# Altium schematic symbol library jig.SchLib: 22 symbols
Pins are listed as number, name and electrical type; pins without a type are passive.

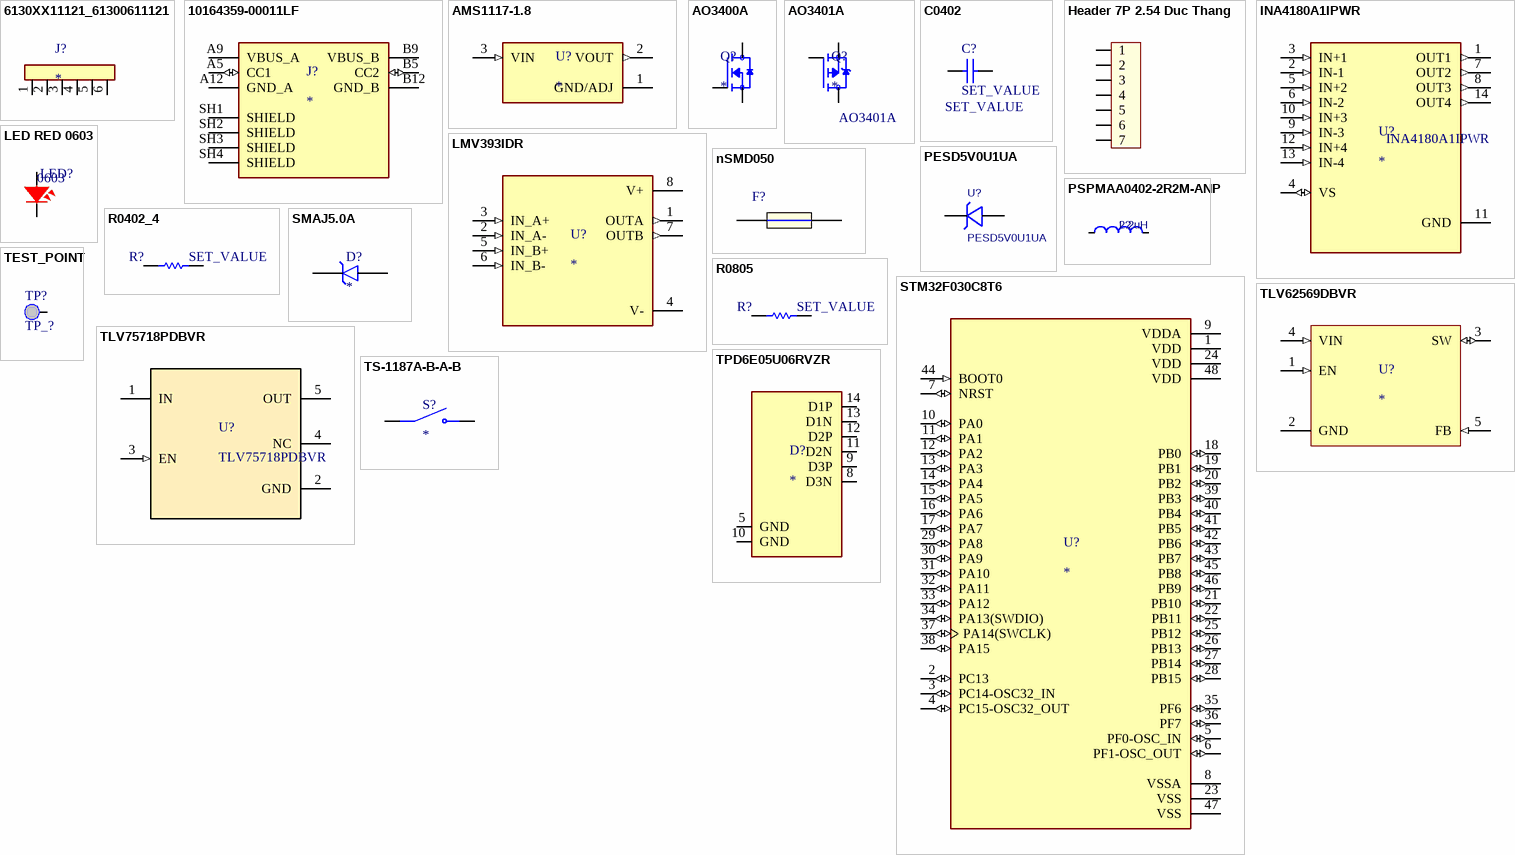
[diagram p0: symbols 6130XX11121_61300611121 to TS-1187A-B-A-B]

## 6130XX11121_61300611121
designator J?
CON THT 6P 3A 250VAC Pitch_2.54mm SINGLE-ROW PIN HEADER; MF: {'manufacturer': u'Wurth Electronics'}; MP: 61300611121; Package: None; Price: None; Value: *; Availability: Unavailable
footprint 61300611121
pins: 1, 2, 3, 4, 5, 6

## 10164359-00011LF
designator J?
CON SMD 6P USB TYPE-C RECEPTACLE SINGLE-ROW 10164359-00011LF; Manufacturer: Amphenol ICC; MF: Amphenol; MP: 1016435900011LF; SnapEDA_Link: https://www.snapeda.com/parts/1016435900011LF/Amphenol/view-part/?ref=snap; Package: USB-C-16P; Value: *; Check_prices: https://www.snapeda.com/parts/1016435900011LF/Amphenol/view-part/?ref=eda; JLCPCB Part #: C165948; LCSC Part #: C165948; Manufacturer Part Number: 10164359-00011LF
footprint AMPHENOL_10164359-00011LF
pins: A5 CC1 (io), A9 VBUS_A (power), A12 GND_A (power), B5 CC2 (io), B9 VBUS_B (power), B12 GND_B (power), SH1 SHIELD, SH2 SHIELD, SH3 SHIELD, SH4 SHIELD

## AMS1117-1.8
designator U?
IC SOT-223 LDO AMS1117-1.8; MANUFACTURER UNVERIFIED; Package: None; Price: None; Value: *; MP: AMS1117-1.8; Availability: Unavailable
footprint SOT229P700X180-4N
pins: 1 GND/ADJ (power), 2 VOUT (out), 3 VIN (in)

## AO3400A
designator Q?
N-MOS SOT-23 Vds_30V IdMax_5.7A@TA25C AO3400A; MF: Alpha & Omega Semiconductor; SnapEDA_Link: https://www.snapeda.com/parts/AO3400A/Alpha/view-part/?ref=snap; Package: SOT-23; Value: *; MP: AO3400A; Check_prices: https://www.snapeda.com/parts/AO3400A/Alpha/view-part/?ref=eda; JLCPCB Part #: C20917; LCSC Part #: C20917; Manufacturer: Alpha & Omega Semiconductor; Manufacturer Part Number: AO3400A
footprint SOT95P280X125-3N
pins: 1 G, 2 S, 3 D

## AO3401A
designator Q?  MP: AO3401A
P-MOS SOT-23 Vds_-30V IdMax_-4A@TA25C AO3401A; MF: Alpha & Omega Semiconductor; SnapEDA_Link: https://www.snapeda.com/parts/AO3401A/Alpha/view-part/?ref=snap; Package: SOT-23; Value: *; Check_prices: https://www.snapeda.com/parts/AO3401A/Alpha/view-part/?ref=eda; JLCPCB Part #: C15127; LCSC Part #: C15127; Manufacturer: Alpha & Omega Semiconductor; Manufacturer Part Number: AO3401A
footprint SOT23-3
pins: 1 G, 2 S, 3 D

## C0402
designator C?, comment SET_VALUE
CAP 0402 MLCC NON-POLARIZED GENERIC; VALUE TOLERANCE VOLTAGE AND MPN SET ON INSTANCE; Type: Capacitor; Value2: SET_VOLTAGE; Case: 0402; Package: 0402; Value1: SET_VALUE
footprint C0402L
pins: 1, 2

## Header 7P 2.54 Duc Thang
designator H?
CON THT 7P Pitch_2.54mm SINGLE-ROW; MPN UNVERIFIED; Ten_Linh_Kien: Header 7P XH2.54-7P Đực Thẳng; Ma_Hang: MH003369; Chung_Loai: Cắm; Don_Vi: Con
footprint HDR_1X07_P2.54_D1.10
pins: 1, 2, 3, 4, 5, 6, 7

## INA4180A1IPWR
designator U?  Manufacturer Part Number: INA4180A1IPWR
IC TSSOP-14 GAIN_20V/V QUAD CURRENT-SENSE AMPLIFIER INA4180A1IPWR; MF: Texas Instruments; SnapEDA_Link: https://www.snapeda.com/parts/INA4180A1IPWR/Texas+Instruments/view-part/?ref=snap; Package: TSSOP-14; Value: *; MP: INA4180A1IPWR; Check_prices: https://www.snapeda.com/parts/INA4180A1IPWR/Texas+Instruments/view-part/?ref=eda; JLCPCB Part #: C2652192; LCSC Part #: C2652192; Manufacturer: Texas Instruments
footprint SOP65P640X120-14N
pins: 1 OUT1 (out), 2 IN-1 (in), 3 IN+1 (in), 4 VS (io), 5 IN+2 (in), 6 IN-2 (in), 7 OUT2 (out), 8 OUT3 (out), 9 IN-3 (in), 10 IN+3 (in), 11 GND (power), 12 IN+4 (in), 13 IN-4 (in), 14 OUT4 (out)

## LED RED 0603
designator LED?, comment Package: 0603  (hidden comment: LED WHITE)
LED 0603; COLOR AND MPN UNRESOLVED; MPN: GL0603UW01; Manufacturer: Everlight Elec; Manufacturer Part Number: 19-217/R6C-AL1M2VY/3T; Comment Description: LED WHITE 0603; Value2: 5mA; Manu: Guiguang light; Case: 0603; Value1: LED WHITE; Type: LED; JLCPCB Part #: C2286; LCSC Part #: C2286
footprint LED0603_RED
pins: 1, 2

## LMV393IDR
designator U?
IC SOIC-8 DUAL OPEN-COLLECTOR COMPARATOR LMV393IDR; MF: Texas Instruments; SnapEDA_Link: https://www.snapeda.com/parts/LMV393IDR/Texas+Instruments/view-part/?ref=snap; Package: SOIC-8; Value: *; MP: LMV393IDR; Check_prices: https://www.snapeda.com/parts/LMV393IDR/Texas+Instruments/view-part/?ref=eda; JLCPCB Part #: C7984; LCSC Part #: C7984; Manufacturer: Texas Instruments; Manufacturer Part Number: LMV393IDR
footprint SOIC127P599X175-8N
pins: 1 OUTA (out), 2 IN_A- (in), 3 IN_A+ (in), 4 V- (power), 5 IN_B+ (in), 6 IN_B- (in), 7 OUTB (out), 8 V+ (power)

## nSMD050
designator F?, comment PTC 500mA 6V  (value not drawn)
FUSE 1206 PTC RESETTABLE nSMD050; Manu: TECHFUSE; Value1: 1A; Case: 1206; MPN: nSMD050; Type: Fuse; JLCPCB Part #: C1981; LCSC Part #: C1981; Manufacturer: TECHFUSE; Manufacturer Part Number: nSMD050; Package: 1206
footprint R1206Z
pins: 1, 2

## PESD5V0U1UA
designator U?
TVS SOD-323 ESD PROTECTION PESD5V0U1UA; Manufacturer: TECH PUBLIC(台舟); Symbol: PESD5V0U1UA_C19829579; AddInBom: yes; ModelId: 533ebfb2f206414f9035ed0ccba1097dÂŽ0819f05c4eef4c71ace90d822a990e87; ModelName: SOD-323_L1.8-W1.3-LS2.5-RD; ModelTransform: 104.3305,51.181,0,0,0,0,0,-0.004,0; Reverse Stand-Off Voltage (Vrwm): 5V; Clamping Voltage: 10V；14V; Peak Pulse Current (Ipp): 4A@8/20us; Peak Pulse Power Dissipation (Ppp): 65W@8/20us; Voltage - Breakdown: 7.5V; Reverse Leakage Current (Ir): 80nA; level of protection: IEC 61000-4-5；IEC 61000-4-2; Junction Capacitance: 0.5pF; Device: PESD5V0U1UA; LCSC Part Name: 5V截止 峰值浪涌电流：4A@8/20us; SupplierPart: C19829579; ManufacturerPart: PESD5V0U1UA; Supplier Footprint: SOD-323; JLCPCB Part Class: Extended Part; Datasheet: https://item.szlcsc.com/datasheet/PESD5V0U1UA/21156874.html; Supplier: LCSC; ConvertToPcb: yes; FootprintName: SOD-323_L1.8-W1.3-LS2.5-RD
footprint SOD-323_L1.8-W1.3-LS2.5-RD
pins: 1 C, 2 A

## PSPMAA0402-2R2M-ANP
designator L?, comment 2.2uH
IND SMD 2.2uH +/-20% Irms_3A Isat_5A DCRmax_58mOhm MOLDED POWER; Manufacturer: PROD Tech; Symbol: PSPMAA0402-2R2M-ANP; AddInBom: yes; Tolerance: ±20%; Current Rating: 3A; Current - Saturation(Isat): 5A; DC Resistance(DCR): 58 mOhm max; Device: PSPMAA0402-2R2M-ANP; LCSC Part Name: 2.2uH +/-20%, 3A Irms, 5A Isat; SupplierPart: C436515; ManufacturerPart: PSPMAA0402-2R2M-ANP; Supplier Footprint: SMD,4.5x4.1mm; JLCPCB Part Class: Extended Part; Datasheet: https://static.chipdip.ru/lib/612/DOC042612369.pdf; Supplier: LCSC; ConvertToPcb: yes; FootprintName: IND-SMD_L4.1-W4.1_PSPMAA0402-1; Value: 2.2uH
footprint IND-SMD_L4.1-W4.1_PSPMAA0402-1
pins: 1, 2

## R0402_4
designator R?, comment SET_VALUE
RES 0402 GENERIC; VALUE TOLERANCE POWER AND MPN SET ON INSTANCE; Value1: SET_VALUE; Case: 0402; Type: Resistor; Package: 0402
footprint R0402L1
pins: 1, 2

## R0805
designator R?, comment SET_VALUE
RES 0805 GENERIC; VALUE TOLERANCE POWER AND MPN SET ON INSTANCE; Value1: SET_VALUE; Case: 0805; Type: Resistor; Package: 0805
footprint R0805
pins: 1, 2

## SMAJ5.0A
designator D?
TVS SMA/DO-214AC Vrwm_5V Ppk_400W@10/1000us UNIDIRECTIONAL SMAJ5.0A; MF: Bourns; SnapEDA_Link: https://www.snapeda.com/parts/SMAJ5.0A/Bourns/view-part/?ref=snap; Package: DO-214 Bourns; Value: *; MP: SMAJ5.0A; Check_prices: https://www.snapeda.com/parts/SMAJ5.0A/Bourns/view-part/?ref=eda
footprint DIOM5026X229N
pins: 1 K, 2 A

## STM32F030C8T6
designator U?
IC LQFP-48 48MHz 64KB-FLASH 8KB-SRAM ARM CORTEX-M0 MCU STM32F030C8T6; MF: STMicroelectronics; SnapEDA_Link: https://www.snapeda.com/parts/STM32F030C8T6/STMicroelectronics/view-part/?ref=snap; Package: LQFP-48_7x7mm; Value: *; MP: STM32F030C8T6; Check_prices: https://www.snapeda.com/parts/STM32F030C8T6/STMicroelectronics/view-part/?ref=eda; JLCPCB Part #: C23922; LCSC Part #: C23922; Manufacturer: STMicroelectronics; Manufacturer Part Number: STM32F030C8T6
footprint QFP50P900X900X160-48N
pins: 1 VDD (power), 2 PC13 (io), 3 PC14-OSC32_IN (io), 4 PC15-OSC32_OUT (io), 5 PF0-OSC_IN (io), 6 PF1-OSC_OUT (io), 7 NRST (io), 8 VSSA (power), 9 VDDA (power), 10 PA0 (io), 11 PA1 (io), 12 PA2 (io), 13 PA3 (io), 14 PA4 (io), 15 PA5 (io), 16 PA6 (io), 17 PA7 (io), 18 PB0 (io), 19 PB1 (io), 20 PB2 (io), 21 PB10 (io), 22 PB11 (io), 23 VSS (power), 24 VDD (power), 25 PB12 (io), 26 PB13 (io), 27 PB14 (io), 28 PB15 (io), 29 PA8 (io), 30 PA9 (io), 31 PA10 (io), 32 PA11 (io), 33 PA12 (io), 34 PA13(SWDIO) (io), 35 PF6 (io), 36 PF7 (io), 37 PA14(SWCLK) (io), 38 PA15 (io), 39 PB3 (io), 40 PB4 (io), 41 PB5 (io), 42 PB6 (io), 43 PB7 (io), 44 BOOT0 (in), 45 PB8 (io), 46 PB9 (io), 47 VSS (power), 48 VDD (power)

## TEST_POINT
designator TP?, comment TP_?
TP SMD 1P PadDia_1.50mm ROUND COPPER TEST POINT
footprint TP_SMD_1P50 (Single 1.50 mm round top-layer copper test point for probing)
pins: 1 TP

## TLV62569DBVR
designator U?
IC SOT-23-5 2A Vin_2.5-5.5V SYNCHRONOUS BUCK CONVERTER TLV62569DBVR; MF: Texas Instruments; SnapEDA_Link: https://www.snapeda.com/parts/TLV62569DBVR/Texas+Instruments/view-part/?ref=snap; Package: SOT-23-5 Texas Instruments; Value: *; MP: TLV62569DBVR; Check_prices: https://www.snapeda.com/parts/TLV62569DBVR/Texas+Instruments/view-part/?ref=eda
footprint SOT95P280X145-5N
pins: 1 EN (in), 2 GND (power), 3 SW (io), 4 VIN (in), 5 FB (in)

## TLV75718PDBVR
designator U?
IC SOT-23-5 1A LDO WITH ENABLE TLV75718PDBVR; Manufacturer_Name: Texas Instruments; TYPE: TYPE; RefDes: RefDes; Copyright: Copyright (C) 2025 Ultra Librarian. All rights reserved.; Manufacturer_Part_Number: TLV75718PDBVR
footprint DBV0005A_M
pins: 1 IN (power), 2 GND (power), 3 EN (in), 4 NC, 5 OUT (power)

## TPD6E05U06RVZR
designator D?
TVS USON-14 6-CHANNEL LOW-CAPACITANCE ESD PROTECTION TPD6E05U06RVZR; MP: TPD6E05U06RVZR; Price: None; Package: None; Value: *; Availability: Unavailable
footprint SON50P135X350X55-14N
pins: 5 GND (power), 8 D3N (io), 9 D3P (io), 10 GND (power), 11 D2N (io), 12 D2P (io), 13 D1N (io), 14 D1P (io)

## TS-1187A-B-A-B
designator S?
SW SMD TACTILE TS-1187A-B-A-B; Manufacturer: SHOU HAN; MP: TS-1187A-B-A-B; Value: *; Price: None; Package: SMD-5.2x5.2mm; Availability: Unavailable; JLCPCB Part #: C318884; LCSC Part #: C318884; Manufacturer Part Number: TS-1187A-B-A-B
footprint SW_TS-1187A-B-A-B
pins: A COM, B COM, C NO, D NO